# Altium schematic symbol library TD-102-G-AA.SchLib: 1 symbol
Pins are listed as number, name and electrical type; pins without a type are passive.

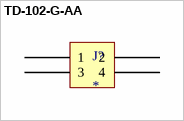
[diagram p0: symbol TD-102-G-AA]

## TD-102-G-AA
designator J?
4-Pin (2x2) Double-Row Vertical Male Header, 2.54mm Pitch, THT, Gold-Plated
footprint PCBComponent
pins: 1, 2, 3, 4